# Altium footprint library Miscellaneous$.PcbLib: 44 footprints (part 3 of 3)
Each footprint in its own frame and in the unit in brackets; x right, y up, seen from the top. Pads: shape width x height; smd on the part's side, far side on the other; paste and mask are expansions set on the pad; w line width, h text height; cw(c..) or ccw(c..) is an arc to the next point about the centre after c.
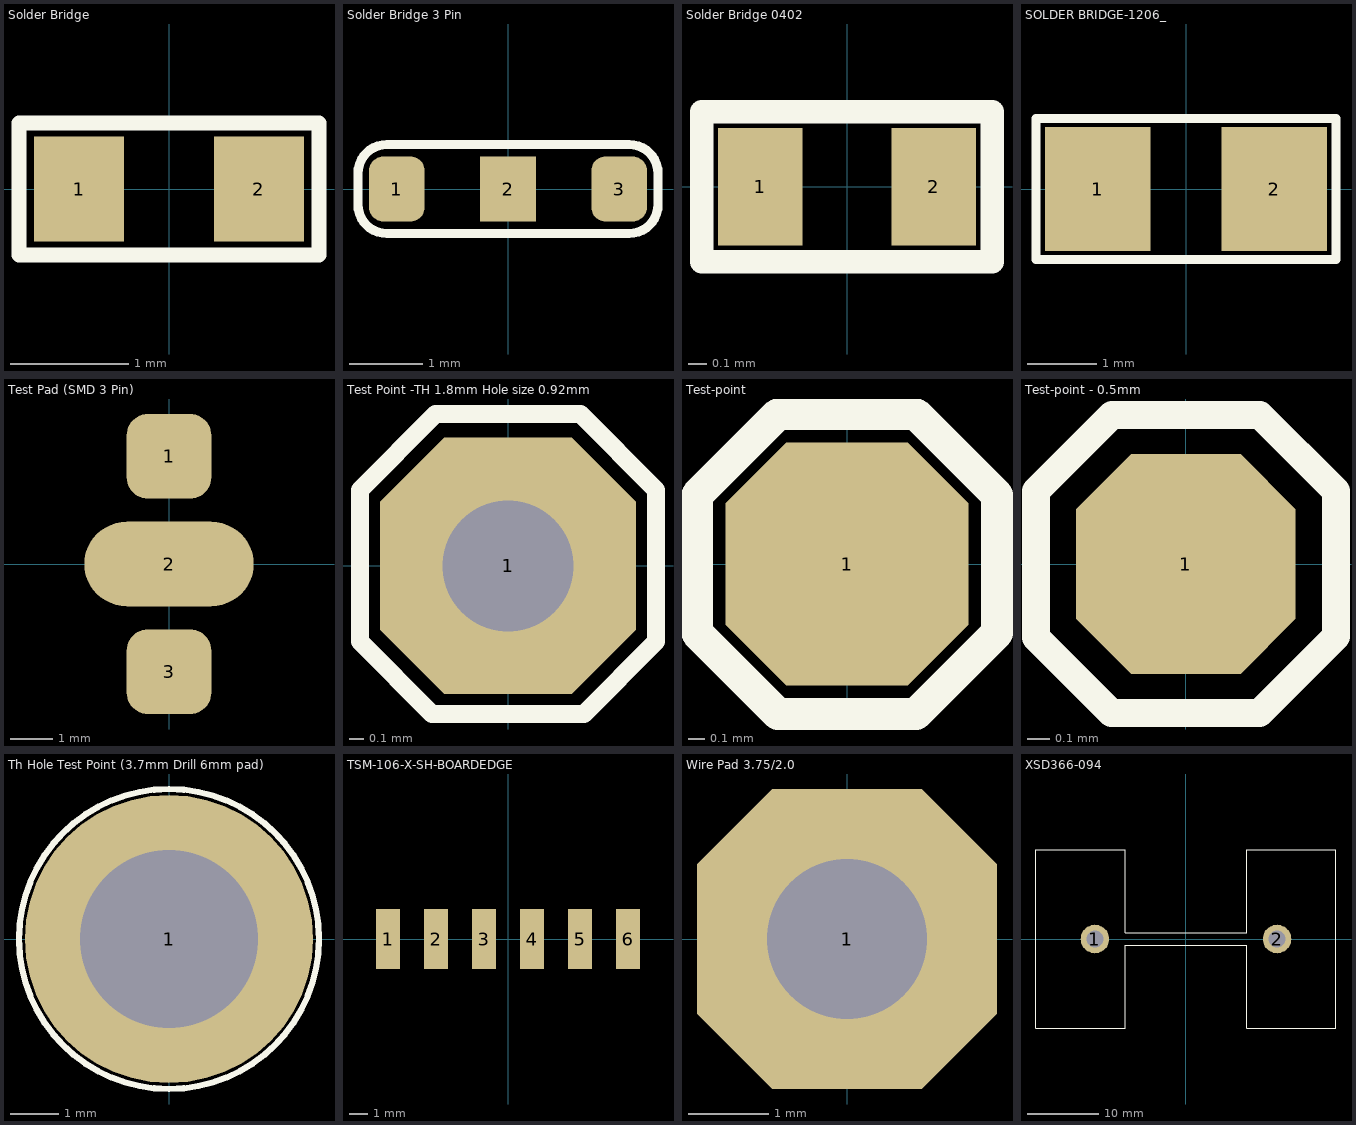
[diagram p2: the footprints below, top view; thin cyan lines are the x and y axes]

## Solder Bridge [mil] "Solder Bridge ON"
pads (2):
  rect 30x35 smd: 1(-30,0) 2(30,0)
Top Overlay:
  lines w5: -50,-22 50,-22 50,22 -50,22 -50,-22

## Solder Bridge 3 Pin [mil]
pads (3):
  rrect50% 30x35 smd: 1(-60,0) 3(60,0)
  rect 30x35 smd: 2(0,0)
Top Overlay:
  lines w5: -81,-8.53 ccw(c-65.53,-8.53) -65.53,-24 65.53,-24 ccw(c65.53,-8.53) 81,-8.53 81,8.53 ccw(c65.53,8.53) 65.53,24 -65.53,24 ccw(c-65.53,8.53) -81,8.53 -81,-8.53

## Solder Bridge 0402 [mil]
pads (2):
  rect 18x25 smd mask+2.17: 1(-18.5,0) 2(18.5,0)
Top Overlay:
  lines w0.13: -32,-17 32,-17
  lines w5: -31,-16 31,-16 31,16 -31,16 -31,-16

## SOLDER BRIDGE-1206_ [mil]
pads (2):
  rect 60x70 smd: 1(-50,0) 2(50,0)
Top Overlay:
  lines w5: -85,-40 85,-40 85,40 -85,40 -85,-40

## Test Pad (SMD 3 Pin) [mm]
pads (3):
  rrect50% 2x2 smd: 1(0,2.54) 3(0,-2.54)
  oval 4x2 smd: 2(0,0)

## Test Point -TH 1.8mm Hole size 0.92mm [mm]
pads (1):
  oct 1.8x1.8 hole 0.92: 1(0,0)
Top Overlay:
  lines w0.127: -0.533,-1.041 -1.041,-0.533 -1.041,0.533 -0.508,1.067 0.508,1.067 1.041,0.533 1.041,-0.533 0.533,-1.041 -0.508,-1.041

## Test-point [mil]
pads (1):
  oct 60x60 smd: 1(0,0)
Top Overlay:
  lines w7.87: -37,-17 -37,17 -17,37 17,37 37,17 37,-17 17,-37 -17,-37 -37,-17

## Test-point - 0.5mm [mm]
pads (1):
  oct 1x1 smd: 1(0,0)
Top Overlay:
  lines w0.127: -0.682,-0.334 -0.337,-0.679 0.335,-0.679 0.684,-0.33 0.684,0.332 0.336,0.68 -0.336,0.68 -0.682,0.333 -0.682,-0.334

## Th Hole Test Point (3.7mm Drill 6mm pad) [mm]
pads (1):
  round 6 hole 3.7: 1(0,0)
Top Overlay:
  circle w0.127: c0,0 r3.124

## TSM-106-X-SH-BOARDEDGE [mm] "TSM-106-X-SH-BOARDEDGE"
pads (6):
  rect 1.27x3.175 smd: 1(-6.35,0) 2(-3.81,0) 3(-1.27,0) 4(1.27,0) 5(3.81,0) 6(6.35,0)
3D body: height 1.27, standoff 0, extent -6.985,-1.587 -5.715,1.587
3D body: height 1.27, standoff 0, extent -4.445,-1.587 -3.175,1.587
3D body: height 1.27, standoff 0, extent -1.905,-1.587 -0.635,1.587
3D body: height 1.27, standoff 0, extent 0.635,-1.587 1.905,1.587
3D body: height 1.27, standoff 0, extent 3.175,-1.587 4.445,1.587
3D body: height 1.27, standoff 0, extent 5.715,-1.587 6.985,1.587

## Wire Pad 3.75/2.0 [mm]
pads (1):
  oct 3.75x3.75 hole 2: 1(0,0)

## XSD366-094 [mm]
pads (2):
  round 4 hole 2.4 paste-2539.97 mask+0.102: 1(-12.75,0) 2(12.75,0)
Top Overlay:
  lines w0.127: -21,-12.5 -8.5,-12.5 -8.5,-0.9 8.5,-0.9 8.5,-12.5 21,-12.5 21,12.5 8.5,12.5 8.5,0.9 -8.5,0.9 -8.5,12.5 -21,12.5 -21,-12.5
3D body "XSD XSD366-094.STEP": height 25.3, standoff -3.2, extent -21.31,-12.762 21.31,12.762